# Altium integrated library 430450213.IntLib: 1 symbol
Pins are listed as number, name and electrical type; pins without a type are passive.

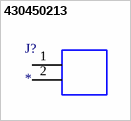
[diagram p0: symbol 430450213]

## 430450213
designator J?
Connector Header Through Hole 2 position -; MF: Molex; MP: 430450213; SnapEDA_Link: https://www.snapeda.com/parts/430450213/Molex/view-part/?ref=snap; Package: None; Value: *; Check_prices: https://www.snapeda.com/parts/430450213/Molex/view-part/?ref=eda
footprint CONN_SD-43045-005_02_MOL
pins: 1, 2